# Altium schematic symbol library RamonLogo.SchLib: 1 symbol
Pins are listed as number, name and electrical type; pins without a type are passive.

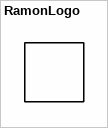
[diagram p0: symbol RamonLogo]

## RamonLogo
designator RAMON?, comment WWW.RAMONIC.COM  (value not drawn)
footprint PCBComponent_1
footprint PCBComponent_1